# Altium schematic symbol library discretes.SchLib: 1 symbol
Pins are listed as number, name and electrical type; pins without a type are passive.

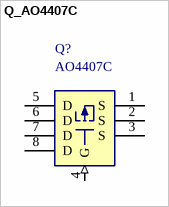
[diagram p0: symbol Q_AO4407C]

## Q_AO4407C
designator Q?, comment AO4407C
P-MOSFET -30 V, VGS +/-25 V, RDS(on) < 11.5 mOhm @ -10 V, < 18.5 mOhm @ -4.5 V, SO-8 (datasheet Preliminary); Manufacturer: Alpha & Omega Semicon; Value: AO4407C; MPN: AO4407C; LCSC: C469397; JLCPCB Type: Extended; Datasheet: AO4407C_C469397.pdf
footprint SOIC8_MS012
pins: 1 S, 2 S, 3 S, 4 G (in), 5 D, 6 D, 7 D, 8 D